# Altium footprint library StandardCase.PcbLib: 209 footprints (part 1 of 14)
Each footprint in its own frame and in the unit in brackets; x right, y up, seen from the top. Pads: shape width x height; smd on the part's side, far side on the other; paste and mask are expansions set on the pad; w line width, h text height; cw(c..) or ccw(c..) is an arc to the next point about the centre after c.
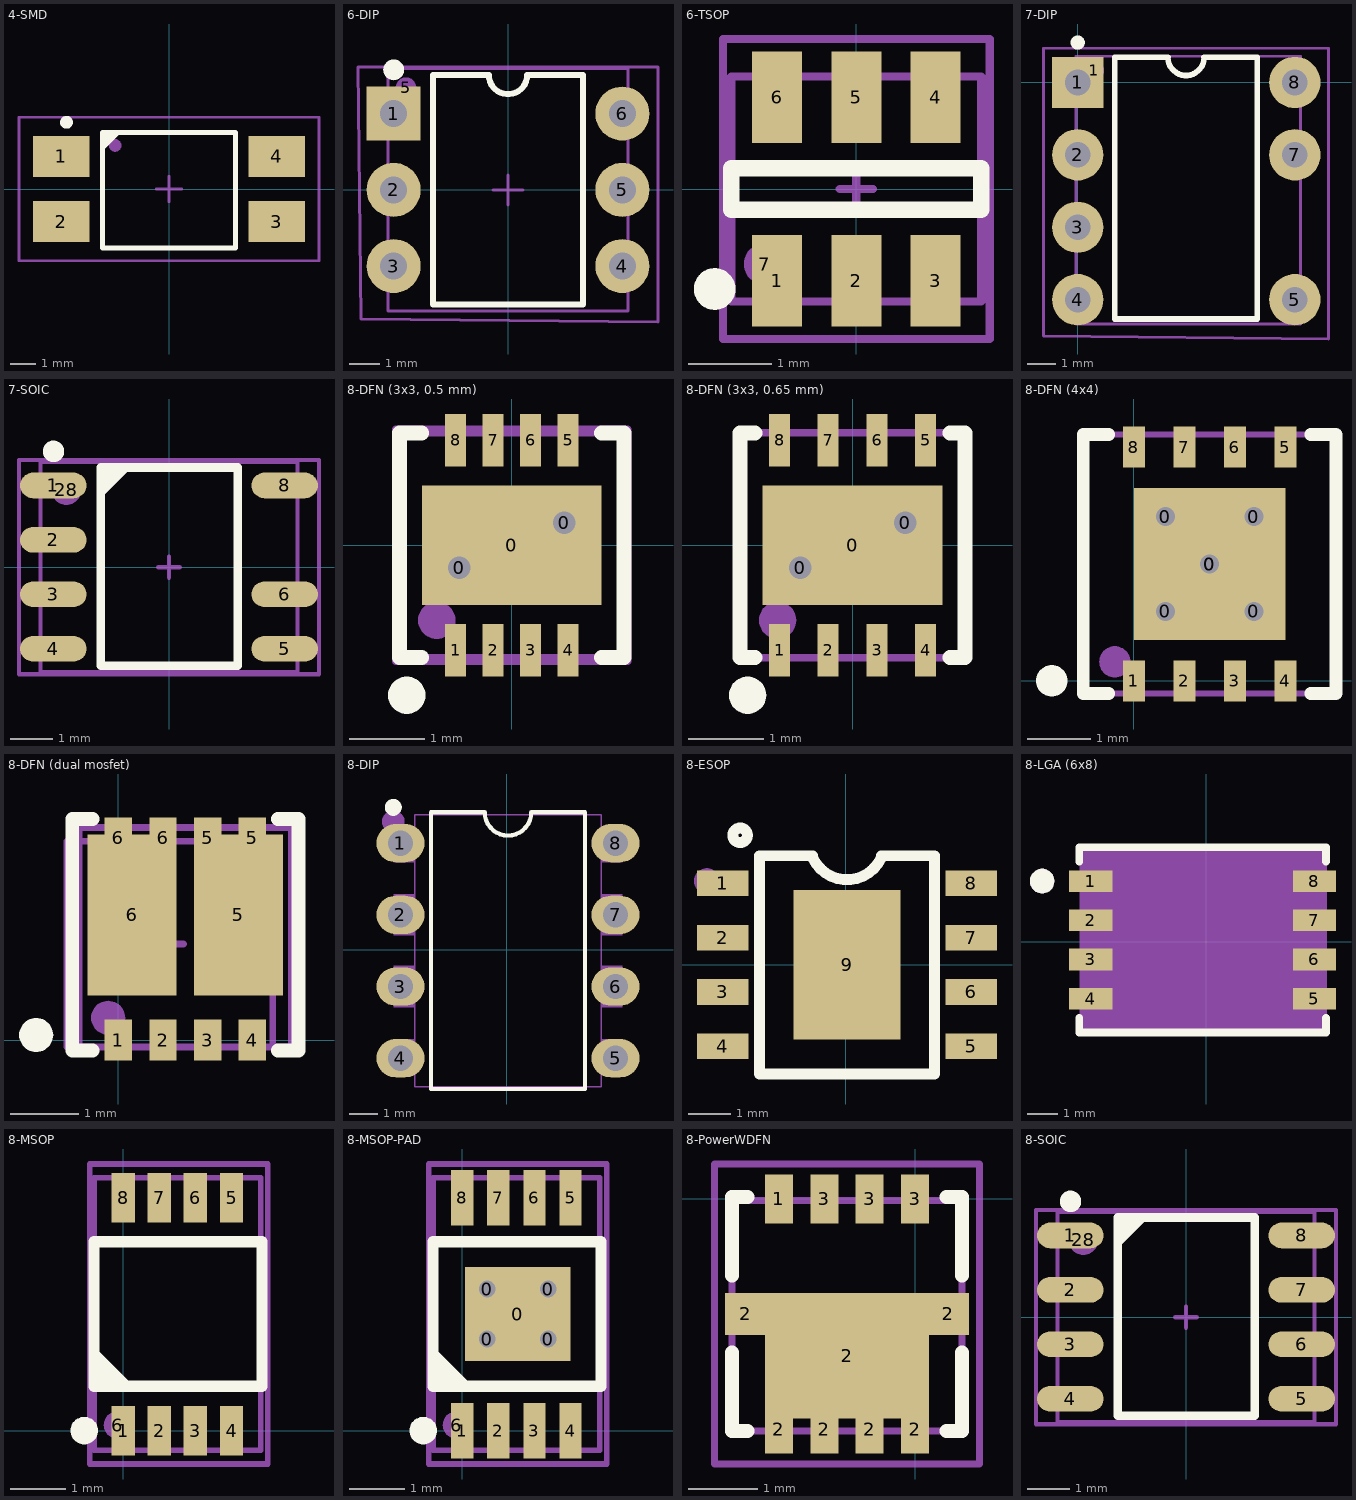
[diagram p0: the footprints below, top view; thin cyan lines are the x and y axes]

## 4-SMD [mm] "SOIC, 4-Leads, Body 4,60x6,50mm, Pitch 1,27mm, IPC Medium Density"
height 4
pads (5):
  rect 2.2x1.6 smd: 1(-4.2,1.27) 2(-4.2,-1.27) 3(4.2,-1.27) 4(4.2,1.27)
  round 0.5 on Mech1: ""(-2.1,1.7)
Top Overlay:
  circle w0.25: c-4,2.6 r0.125
  region: -2.6,2.2 -2.6,1.48 -1.88,2.2
  lines w0.2: -2.6,-2.3 -2.6,2.2 2.6,2.2 2.6,-2.3 -2.6,-2.3
Mechanical 1:
  lines w0.1: -2.6,-2.3 -2.6,2.2 2.6,2.2 2.6,-2.3 -2.6,-2.3
Mechanical 15:
  lines w0.1: -0.5,0 0.5,0 ; 0,-0.5 0,0.5 ; -5.85,-2.8 -5.85,2.8 5.85,2.8 5.85,-2.8 -5.85,-2.8
3D body "PC817 Gullwing Assembly.STEP": height 3.75, standoff -0.1, extent -5,-2.28 5,2.3

## 6-DIP [mm] "pitch 2.54 mm"
height 5.6
pads (8):
  rect 1.8x1.8 hole 0.9: 1(-3.81,2.54)
  round 1.8 hole 0.9: 2(-3.81,0) 3(-3.81,-2.54) 4(3.81,-2.54) 5(3.81,0) 6(3.81,2.54)
  round 0.7 on Mech1: 5(-3.4,3.4)
  round 0.7 on Top Overlay: ""(-3.81,4)
Top Overlay:
  lines w0.2: -2.5,-3.82 -2.5,3.82 -0.635,3.82 ccw(c0,3.82) 0.635,3.82 2.5,3.82 2.5,-3.82 -2.5,-3.82
Mechanical 1:
  lines w0.1: -4,-4.04 -4,4.04 4,4.04 4,-4.04 -4,-4.04
Mechanical 15:
  lines w0.1: -0.5,0 0.5,0 ; 0,-0.5 0,0.5 ; -5,4.1 -4.9,-4.3 5,-4.4 5,4.1 -5,4.1
3D body "CircuitWorks-DIP6.step": height 4.31, standoff -3.28, extent -4,-4.04 4,4.04

## 6-TSOP [mm] "pitch 0.95 mm"
pads (7):
  rect 0.6x1.1 smd: 1(-0.95,-1.1) 2(0,-1.1) 3(0.95,-1.1) 4(0.95,1.1) 5(0,1.1) 6(-0.95,1.1)
  round 0.5 on Mech1: 7(-1.1,-0.9)
Top Overlay:
  circle w0.25: c-1.7,-1.2 r0.125
  lines w0.2: -1.5,-0.25 1.5,-0.25 1.5,0.25 -1.5,0.25 -1.5,-0.25
Mechanical 1:
  lines w0.1: -1.5,-1.35 -1.5,1.35 1.5,1.35 1.5,-1.35 -1.5,-1.35
Mechanical 15:
  lines w0.1: -0.2,0 0.2,0 ; 0,-0.2 0,0.2 ; -1.6,-1.8 1.6,-1.8 1.6,1.8 -1.6,1.8 -1.6,-1.8
3D body "User Library-TSOP-6.STEP": height 1, standoff 0, extent -1.5,-1.35 1.5,1.35

## 7-DIP [mm] "pitch 2.54 mm"
height 5.08
pads (8):
  rect 1.8x1.8 hole 0.9: 1(0,0)
  round 0.7 on Mech1: 1(0.58,0.42)
  round 1.8 hole 0.9: 2(0,-2.54) 3(0,-5.08) 4(0,-7.62) 5(7.62,-7.62) 7(7.62,-2.54) 8(7.62,0)
Top Overlay:
  circle w0.25: c0,1.4 r0.125
  lines w0.2: 1.3,-8.3 1.3,0.88 3.165,0.88 ccw(c3.8,0.88) 4.435,0.88 6.3,0.88 6.3,-8.3 1.3,-8.3
Mechanical 1:
  lines w0.1: -0.055,-8.48 -0.055,0.92 7.815,0.92 7.815,-8.48 -0.055,-8.48
Mechanical 15:
  lines w0.1: -1.2,-8.9 8.8,-9 8.8,-6.6 8.8,1.2 -1.2,1.2 -1.2,-0.5 -1.2,-8.9
3D body "DIP-7 (VIPER28).stp": height 4.36, standoff -3, extent -0.035,-8.5 7.835,0.9

## 7-SOIC [mm] "pitch 1.27 mm"
height 5.08
pads (8):
  rrect100% 1.55x0.6 smd: 1(-2.7,1.905) 2(-2.7,0.635) 3(-2.7,-0.635) 4(-2.7,-1.905) 5(2.7,-1.905) 6(2.7,-0.635) 8(2.7,1.905)
  round 0.7 on Mech1: 28(-2.395,1.8)
Top Overlay:
  circle w0.25: c-2.695,2.7 r0.125
  region: -1.595,2.325 -1.595,1.605 -0.875,2.325
  lines w0.2: -1.595,-2.3 1.605,-2.3 1.605,2.325 -1.595,2.325 -1.595,-2.3
Mechanical 1:
  lines w0.1: -3,-2.45 -3,2.45 3,2.45 3,-2.45 -3,-2.45
Mechanical 15:
  lines w0.1: -0.25,0 0.25,0 ; 0,-0.25 0,0.25 ; -3.5,-2.5 -3.5,2.5 3.5,2.5 3.5,-2.5 -3.5,-2.5
3D body "User Library-SOIC-8-1.STEP": height 1.75, standoff 0, extent -3,-2.45 3,2.45

## 8-DFN (3x3, 0.5 mm) [mm] "3x3 mm, pitch 0.5 mm, power pad"
height 0.75
pads (13):
  round 0.7 hole 0.3: 0(-0.7,-0.3) 0(0.7,0.3)
  rect 2.4x1.6 smd mask+0.05: 0(0,0)
  rect 0.28x0.7 smd mask+0.05: 1(-0.75,-1.4) 2(-0.25,-1.4) 3(0.25,-1.4) 4(0.75,-1.4) 5(0.75,1.4) 6(0.25,1.4) 7(-0.25,1.4) 8(-0.75,1.4)
  round 0.5 on Top Overlay mask+0.05: ""(-1.4,-2)
  round 0.5 on Mech1 mask+0.05: ""(-1,-1)
Top Overlay:
  lines w0.2: -1.2,-1.5 -1.5,-1.5 -1.5,1.5 -1.2,1.5 ; 1.2,-1.5 1.5,-1.5 1.5,1.5 1.2,1.5
Mechanical 1:
  lines w0.1: -1.55,-1.55 -1.55,1.55 1.55,1.55 1.55,-1.55 -1.55,-1.55
Mechanical 15:
  lines w0.1: -0.2,0 0.2,0 ; 0,-0.2 0,0.2 ; -1.5,-1.5 1.5,-1.5 1.5,1.5 -1.5,1.5 -1.5,-1.5
3D body "User Library-My-DFN-8-3x3-0_5.STEP": height 0.8, standoff 0, extent -1.55,-1.56 1.55,1.56

## 8-DFN (3x3, 0.65 mm) [mm] "3x3 mm, pitch 0.65 mm, power pad"
height 0.75
pads (13):
  round 0.7 hole 0.3: 0(-0.7,-0.3) 0(0.7,0.3)
  rect 2.4x1.6 smd mask+0.05: 0(0,0)
  rect 0.28x0.7 smd mask+0.05: 1(-0.975,-1.4) 2(-0.325,-1.4) 3(0.325,-1.4) 4(0.975,-1.4) 5(0.975,1.4) 6(0.325,1.4) 7(-0.325,1.4) 8(-0.975,1.4)
  round 0.5 on Top Overlay mask+0.05: ""(-1.4,-2)
  round 0.5 on Mech1 mask+0.05: ""(-1,-1)
Top Overlay:
  lines w0.2: -1.3,-1.5 -1.5,-1.5 -1.5,1.5 -1.3,1.5 ; 1.3,-1.5 1.5,-1.5 1.5,1.5 1.3,1.5
Mechanical 1:
  lines w0.1: -1.495,-1.5 1.495,-1.5 1.495,1.5 -1.495,1.5 -1.495,-1.5
Mechanical 15:
  lines w0.1: -0.2,0 0.2,0 ; 0,-0.2 0,0.2 ; -1.5,-1.5 1.5,-1.5 1.5,1.5 -1.5,1.5 -1.5,-1.5
3D body "User Library-DFN8N_65.STEP": height 0.9, standoff 0, extent -1.495,-1.5 1.495,1.5

## 8-DFN (4х4) [mm] "4x4 mm, pitch 0.8 mm, power pad"
height 0.9
pads (16):
  round 0.7 hole 0.3: 0(0.5,1.1) 0(0.5,2.6) 0(1.2,1.85) 0(1.9,1.1) 0(1.9,2.6)
  rect 2.4x2.4 smd: 0(1.2,1.85)
  rect 0.35x0.65 smd: 1(0,0) 2(0.8,0) 3(1.6,0) 4(2.4,0) 5(2.4,3.7) 6(1.6,3.7) 7(0.8,3.7) 8(0,3.7)
  round 0.5 on Top Overlay: ""(-1.3,0)
  round 0.5 on Mech1: ""(-0.3,0.3)
Top Overlay:
  lines w0.2: -0.4,-0.2 -0.8,-0.2 -0.8,3.9 -0.4,3.9 ; 2.8,-0.2 3.2,-0.2 3.2,3.9 2.8,3.9
Mechanical 1:
  lines w0.1: -0.8,-0.2 -0.8,3.9 3.2,3.9 3.2,-0.2 -0.8,-0.2
Mechanical 15:
  lines w0.1: -0.8,-0.2 -0.8,3.9 3.2,3.9 3.2,-0.2 -0.8,-0.2
3D body "User Library-DFN8 Body 4x4 Pitch 0_8mm.STEP": height 0.97, standoff -0.03, extent -0.8,-0.2 3.2,3.9

## 8-DFN (dual mosfet) [mm] "3x3 mm, pitch 0.65 mm"
height 0.75
pads (12):
  rect 0.4x0.6 smd mask+0.05: 1(0,0) 2(0.65,0) 3(1.3,0) 4(1.95,0) 5(1.3,2.95) 5(1.95,2.95) 6(0,2.95) 6(0.65,2.95)
  rect 1.3x2.35 smd: 5(1.75,1.825) 6(0.2,1.825)
  round 0.5 on Top Overlay mask+0.05: ""(-1.2,0.075)
  round 0.5 on Mech1 mask+0.05: ""(-0.15,0.325)
Top Overlay:
  lines w0.2: -0.375,-0.15 -0.675,-0.15 -0.675,3.225 -0.375,3.225 ; 2.325,-0.15 2.625,-0.15 2.625,3.225 2.325,3.225
Mechanical 1:
  lines w0.1: -0.575,-0.1 2.525,-0.1 2.525,3.1 -0.575,3.1 -0.575,-0.1
Mechanical 15:
  lines w0.1: 0.55,1.4 0.95,1.4 ; 0.75,1.2 0.75,1.6 ; -0.75,-0.1 -0.75,2.9 2.25,2.9 2.25,-0.1 -0.75,-0.1
3D body "User Library-DFN8_3x3_0_65Pitch.STEP": height 0.8, standoff 0, extent -0.575,-0.1 2.525,3.1

## 8-DIP [mm]
pads (8):
  oval 1.7x1.36 hole 0.9: 1(-3.767,3.772) 2(-3.767,1.232) 3(-3.767,-1.308) 4(-3.767,-3.848) 5(3.853,-3.848) 6(3.853,-1.308) 7(3.853,1.232) 8(3.853,3.772)
Top Overlay:
  circle w0.3: c-4.021,5.042 r0.15
  lines w0.152: -2.688,-4.94 -2.688,4.863 -0.782,4.863 ccw(c0.043,4.866) 0.868,4.863 2.774,4.863 2.774,-4.94 -2.688,-4.94
Bottom Assembly:
  circle w0.4: c-4.021,4.534 r0.2
Mechanical 15:
  region: -4.012,4.727 -3.988,4.727 -3.953,4.762 -3.953,4.811 -3.988,4.846 -4.012,4.847 -4.037,4.846 -4.071,4.811 -4.071,4.762 -4.037,4.727
  region: -4.012,0.502 -3.252,0.502 -3.252,1.962 -4.012,1.962
  region: -4.012,0.992 -3.712,0.992 -3.712,1.472 -4.012,1.472
  region: -4.012,-1.548 -3.712,-1.548 -3.712,-1.068 -4.012,-1.068
  region: -4.012,-2.038 -3.252,-2.038 -3.252,-0.578 -4.012,-0.578
  region: 4.098,-1.068 3.798,-1.068 3.798,-1.548 4.098,-1.548
  region: 4.098,-0.578 3.338,-0.578 3.338,-2.038 4.098,-2.038
  region: 4.098,1.472 3.798,1.472 3.798,0.992 4.098,0.992
  region: 4.098,1.962 3.338,1.962 3.338,0.502 4.098,0.502
  region: -4.012,3.532 -3.712,3.532 -3.712,4.012 -4.012,4.012
  region: -4.012,-4.088 -3.712,-4.088 -3.712,-3.608 -4.012,-3.608
  region: 4.098,4.012 3.798,4.012 3.798,3.532 4.098,3.532
  region: 4.098,3.102 3.338,3.102 3.338,4.022 4.098,4.022
  region: -3.252,3.092 -4.012,3.092 -4.012,4.012 -3.252,4.012
  region: -3.252,-4.088 -4.012,-4.088 -4.012,-3.168 -3.252,-3.168
  region: 3.338,-3.168 4.098,-3.168 4.098,-4.088 3.338,-4.088
  region: 4.098,-3.608 3.798,-3.608 3.798,-4.088 4.098,-4.088
  lines w0.051: -3.257,-4.863 3.343,-4.863 3.343,4.787 -3.257,4.787 -3.257,-4.863
3D body "DIP-8-1.step": height 4.36, standoff -3, extent -3.91,-4.725 3.96,4.675

## 8-ESOP [mm]
pads (9):
  rect 1.2x0.6 smd: 1(-2.883,1.905) 2(-2.883,0.635) 3(-2.883,-0.635) 4(-2.883,-1.905) 5(2.933,-1.905) 6(2.933,-0.635) 7(2.933,0.635) 8(2.933,1.905)
  rect 2.5x3.5 smd: 9(0.025,0)
Top Overlay:
  circle w0.254: c-2.475,3.03 r0.17
  lines w0.254: -0.775,2.5 ccw(c0.025,2.875) 0.825,2.5 ; -0.775,2.55 -2.025,2.55 -2.025,-2.55 2.075,-2.55 2.075,2.55 0.825,2.55
Mechanical 15:
  circle w0.3: c-3.255,1.96 r0.15
3D body "User Library-SOIC-8-1.STEP": height 1.75, standoff 0, extent -2.975,-2.45 3.025,2.45

## 8-LGA (6x8) [mm]
pads (8):
  rect 1.401x0.701 smd paste+0 mask+0.051: 1(-3.74,1.961) 2(-3.74,0.691) 3(-3.74,-0.579) 4(-3.74,-1.849) 5(3.508,-1.849) 6(3.508,-0.579) 7(3.508,0.691) 8(3.508,1.961)
Top Overlay:
  lines w0.254: -4.116,-2.479 -4.116,-2.944 3.885,-2.944 3.885,-2.479 ; -4.116,2.593 -4.116,3.056 3.885,3.056 3.885,2.593
  lines w0.399: -5.516,1.961 -5.506,2.022 -5.478,2.078 -5.435,2.124 -5.379,2.151 -5.315,2.162 -5.254,2.151 -5.198,2.124 -5.155,2.078 -5.125,2.022 -5.117,1.961 -5.125,1.9 -5.155,1.844 -5.198,1.798 -5.254,1.77 -5.315,1.76 -5.379,1.77 -5.435,1.798 -5.478,1.844 -5.506,1.9 -5.516,1.961
Top Assembly:
  lines w0.399: -5.516,1.961 -5.506,2.022 -5.478,2.078 -5.435,2.124 -5.379,2.151 -5.315,2.162 -5.254,2.151 -5.198,2.124 -5.155,2.078 -5.125,2.022 -5.117,1.961 -5.125,1.9 -5.155,1.844 -5.198,1.798 -5.254,1.77 -5.315,1.76 -5.379,1.77 -5.435,1.798 -5.478,1.844 -5.506,1.9 -5.516,1.961
Mechanical 9:
  region: -4.091,-2.919 -4.091,3.081 3.91,3.081 3.91,-2.919
Mechanical 11:
  region: -4.061,3.081 -4.071,3.06 -4.091,3.05 -4.112,3.06 -4.122,3.081 -4.112,3.104 -4.091,3.111 -4.071,3.104
Mechanical 12:
  region: 2.909,-1.55 3.76,-1.55 3.76,-2.098 2.909,-2.098
  region: 2.909,-0.28 3.76,-0.28 3.76,-0.828 2.909,-0.828
  region: 2.909,0.99 3.76,0.99 3.76,0.442 2.909,0.442
  region: 2.909,2.26 3.76,2.26 3.76,1.712 2.909,1.712
  region: -3.941,-1.55 -3.09,-1.55 -3.09,-2.098 -3.941,-2.098
  region: -3.941,-0.28 -3.09,-0.28 -3.09,-0.828 -3.941,-0.828
  region: -3.941,0.99 -3.09,0.99 -3.09,0.442 -3.941,0.442
  region: -3.941,2.26 -3.09,2.26 -3.09,1.712 -3.941,1.712
3D body: height 0.7, standoff 0, extent -4.1,-2.95 3.9,3.05

## 8-MSOP [mm] "pitch 0.65 mm"
pads (10):
  rect 0.42x0.89 smd: 1(0,0) 2(0.65,0) 3(1.3,0) 4(1.95,0) 5(1.95,4.19) 6(1.3,4.19) 7(0.65,4.19) 8(0,4.19)
  round 0.5 on Mech1: 6(-0.1,0.1)
  round 0.5 on Top Overlay: ""(-0.7,0)
Top Overlay:
  region: -0.525,0.8 0.195,0.8 -0.525,1.52
  lines w0.2: -0.525,0.8 2.5,0.8 2.5,3.4 -0.525,3.4 -0.525,0.8
Mechanical 1:
  lines w0.1: -0.525,-0.35 -0.525,4.55 2.475,4.55 2.475,-0.35 -0.525,-0.35
Mechanical 15:
  lines w0.1: -0.6,-0.6 2.6,-0.6 2.6,3.3 2.6,4.8 -0.6,4.8 -0.6,-0.6
3D body "User Library-msop-8.STEP": height 1.15, standoff 0, extent -0.525,-0.35 2.475,4.55

## 8-MSOP-PAD [mm] "pitch 0.65 mm, power pad"
pads (15):
  round 0.7 hole 0.3: 0(0.45,1.65) 0(0.45,2.55) 0(1.55,1.65) 0(1.55,2.55)
  rect 1.9x1.7 smd: 0(1,2.1)
  rect 0.4x1 smd: 1(0,0) 2(0.65,0) 3(1.3,0) 4(1.95,0) 5(1.95,4.19) 6(1.3,4.19) 7(0.65,4.19) 8(0,4.19)
  round 0.5 on Mech1: 6(-0.1,0.1)
  round 0.5 on Top Overlay: ""(-0.7,0)
Top Overlay:
  region: -0.525,0.8 0.195,0.8 -0.525,1.52
  lines w0.2: -0.525,0.8 -0.525,3.4 2.5,3.4 2.5,0.8 -0.525,0.8
Mechanical 1:
  lines w0.1: -0.525,-0.35 2.475,-0.35 2.475,4.55 -0.525,4.55 -0.525,-0.35
Mechanical 15:
  lines w0.1: -0.6,-0.6 -0.6,4.8 2.6,4.8 2.6,3.3 2.6,-0.6 -0.6,-0.6
3D body "User Library-msop-8.STEP": height 1.15, standoff 0, extent -0.525,-0.35 2.475,4.55

## 8-PowerWDFN [mm]
pads (11):
  rect 0.4x0.7 smd: 1(-1.95,0) 2(-1.95,-3.3) 2(-1.3,-3.3) 2(-0.65,-3.3) 2(0,-3.3) 3(-1.3,0) 3(-0.65,0) 3(0,0)
  rect 0.6x0.6 smd: 2(-2.425,-1.65) 2(0.475,-1.65)
  rect 2.35x1.8 smd: 2(-0.975,-2.25)
Top Overlay:
  lines w0.2: -2.625,-2.2 -2.625,-3.325 -2.4,-3.325 ; -2.625,-1.1 -2.625,0.025 -2.4,0.025 ; 0.45,-3.325 0.675,-3.325 0.675,-2.2 ; 0.45,0.025 0.675,0.025 0.675,-1.1
Mechanical 1:
  lines w0.1: -2.625,-3.325 -2.625,-0.025 0.675,-0.025 0.675,-3.325 -2.625,-3.325
Mechanical 15:
  lines w0.1: -2.875,-3.8 0.925,-3.8 0.925,0.5 -2.875,0.5 -2.875,-3.8
3D body "WDFN8.STEP": height 0.7, standoff -0.01, extent -2.625,-3.325 0.675,-0.025

## 8-SOIC [mm] "pitch 1.27 mm"
pads (9):
  rrect100% 1.55x0.6 smd: 1(-2.7,1.905) 2(-2.7,0.635) 3(-2.7,-0.635) 4(-2.7,-1.905) 5(2.7,-1.905) 6(2.7,-0.635) 7(2.7,0.635) 8(2.7,1.905)
  round 0.7 on Mech1: 28(-2.395,1.8)
Top Overlay:
  circle w0.25: c-2.695,2.7 r0.125
  region: -1.595,2.325 -1.595,1.605 -0.875,2.325
  lines w0.2: -1.595,-2.3 -1.595,2.325 1.605,2.325 1.605,-2.3 -1.595,-2.3
Mechanical 1:
  lines w0.1: -3,-2.45 3,-2.45 3,2.45 -3,2.45 -3,-2.45
Mechanical 15:
  lines w0.1: -0.25,0 0.25,0 ; 0,-0.25 0,0.25 ; -3.5,-2.5 3.5,-2.5 3.5,2.5 -3.5,2.5 -3.5,-2.5
3D body "User Library-SOIC-8-1.STEP": height 1.75, standoff 0, extent -3,-2.45 3,2.45